# Altium footprint library Orion-Bridge.PcbLib: 21 footprints (part 2 of 2)
Each footprint in its own frame and in the unit in brackets; x right, y up, seen from the top. Pads: shape width x height; smd on the part's side, far side on the other; paste and mask are expansions set on the pad; w line width, h text height; cw(c..) or ccw(c..) is an arc to the next point about the centre after c.
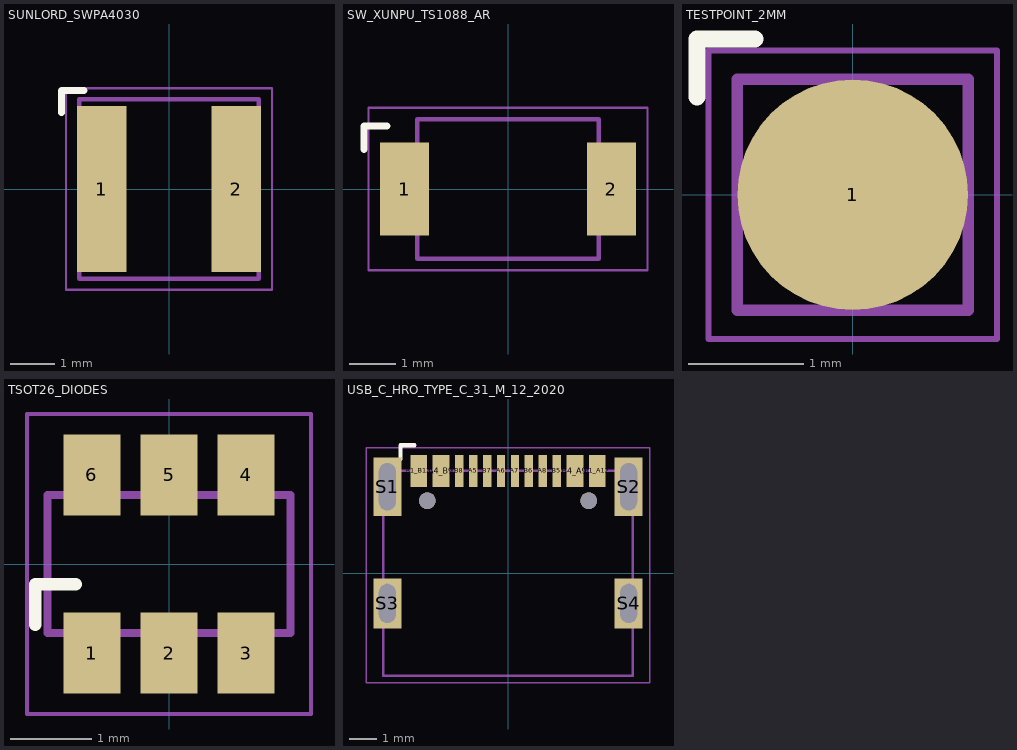
[diagram p1: the footprints below, top view; thin cyan lines are the x and y axes]

## SUNLORD_SWPA4030 [mm] "Sunlord SWPA datasheet2025-05-08 p2 recommended SWPA4030S pattern: gap1.9, padwidth1.1, padheight3.7."
height 3
pads (2):
  rect 1.1x3.7 smd: 1(-1.5,0) 2(1.5,0)
Top Overlay:
  lines w0.15: -2.4,1.7 -2.4,2.2 -1.9,2.2
Component bodies:
  lines w0.1: -2,-2 2,-2 2,2 -2,2 -2,-2
Courtyards:
  lines w0.05: -2.3,-2.25 2.3,-2.25 2.3,2.25 -2.3,2.25 -2.3,-2.25
3D body: height 3, standoff 0.1, extent -2,-2 2,2
3D body: height 3.02, standoff 3, extent -1.6,-1.6 1.6,1.6
3D body: height 0.18, standoff 0.03, extent -1.94,-1.48 -1.06,1.48
3D body: height 0.18, standoff 0.03, extent 1.06,-1.48 1.94,1.48

## SW_XUNPU_TS1088_AR [mm] "XUNPU TS-1088-ARXXXXXX manufacturer drawing: outer width5.50, inner gap3.40, padheight2.00; two terminals, no locating posts."
height 2
pads (2):
  rect 1.05x2 smd: 1(-2.225,0) 2(2.225,0)
Top Overlay:
  lines w0.15: -3.1,0.85 -3.1,1.35 -2.6,1.35
Component bodies:
  lines w0.1: -1.95,-1.5 1.95,-1.5 1.95,1.5 -1.95,1.5 -1.95,-1.5
Courtyards:
  lines w0.05: -3,-1.75 3,-1.75 3,1.75 -3,1.75 -3,-1.75
3D body: height 1.2, standoff 0.12, extent -1.95,-1.5 1.95,1.5
3D body: height 1.5, standoff 1.2, extent -1.9,-1.45 1.9,1.45
3D body: height 2, standoff 1.5, extent -0.9,-0.9 0.9,0.9
3D body: height 0.2, standoff 0.03, extent -2.675,-0.65 -1.775,0.65
3D body: height 0.2, standoff 0.03, extent 1.775,-0.65 2.675,0.65

## TESTPOINT_2MM [mm] "2 mm exposed top-copper test pad; no paste"
pads (1):
  round 2 smd: 1(0,0)
Top Overlay:
  lines w0.15: -1.35,0.85 -1.35,1.35 -0.85,1.35
Component bodies:
  lines w0.1: -1,-1 1,-1 1,1 -1,1 -1,-1
Courtyards:
  lines w0.05: -1.25,-1.25 1.25,-1.25 1.25,1.25 -1.25,1.25 -1.25,-1.25
3D body: height 0.06, standoff 0.03, extent -1,-1 1,1

## TSOT26_DIODES [mm] "Diodes DS41326 Rev3-2 p17 suggested TSOT26 copper: X=.70,Y=1.00,Y1=3.20 total span,C=.95. Top view: pin1 lower-left; pin4 upper-right."
height 1
pads (6):
  rect 0.7x1 smd: 1(-0.95,-1.1) 2(0,-1.1) 3(0.95,-1.1) 4(0.95,1.1) 5(0,1.1) 6(-0.95,1.1)
Top Overlay:
  lines w0.15: -1.65,-0.75 -1.65,-0.25 -1.15,-0.25
Component bodies:
  lines w0.1: -1.5,-0.85 1.5,-0.85 1.5,0.85 -1.5,0.85 -1.5,-0.85
Courtyards:
  lines w0.05: -1.75,-1.85 1.75,-1.85 1.75,1.85 -1.75,1.85 -1.75,-1.85
3D body: height 1, standoff 0.08, extent -1.5,-0.85 1.5,0.85
3D body: height 0.22, standoff 0.03, extent -1.175,-1.35 -0.725,-0.55
3D body: height 0.22, standoff 0.03, extent -0.225,-1.35 0.225,-0.55
3D body: height 0.22, standoff 0.03, extent 0.725,-1.35 1.175,-0.55
3D body: height 0.22, standoff 0.03, extent 0.725,0.55 1.175,1.35
3D body: height 0.22, standoff 0.03, extent -0.225,0.55 0.225,1.35
3D body: height 0.22, standoff 0.03, extent -1.175,0.55 -0.725,1.35
3D body: height 1.01, standoff 1, extent -1.03,-0.64 -0.77,-0.38

## USB_C_HRO_TYPE_C_31_M_12_2020 [mm] "HRO drawing dated2020-12-08 downloaded via JLC C165948. NOT older2018 KiCad footprint: updated front slots1.4, padwidth centres3.20/2.40 and padheight1.14. Body envelope3D is nominal. Shield copper enlarged by0.05mm peredge from manufacturer recommendation to provide0.20mm annular ring; drills unchanged."
height 3.26
pads (18):
  rect 0.6x1.14 smd: A1_B12(-3.2,3.67) A4_B9(-2.4,3.67) B1_A12(3.2,3.67) B4_A9(2.4,3.67)
  rect 0.3x1.14 smd: A5(-1.25,3.67) A6(-0.25,3.67) A7(0.25,3.67) A8(1.25,3.67) B5(1.75,3.67) B6(0.75,3.67) B7(-0.75,3.67) B8(-1.75,3.67)
  rect 1x2.1 hole 0.6 slot 1.7 at 90 deg paste-10: S1(-4.325,3.1) S2(4.325,3.1)
  rect 1x1.8 hole 0.6 slot 1.4 at 90 deg paste-10: S3(-4.325,-1.08) S4(4.325,-1.08)
  round 0.6 hole 0.6 unplated paste-10: ""(-2.89,2.6) ""(2.89,2.6)
Top Overlay:
  lines w0.15: -3.85,4.09 -3.85,4.59 -3.35,4.59
Component bodies:
  lines w0.1: -4.47,-3.675 4.47,-3.675 4.47,3.675 -4.47,3.675 -4.47,-3.675
Courtyards:
  lines w0.05: -5.075,-3.925 5.075,-3.925 5.075,4.49 -5.075,4.49 -5.075,-3.925
3D body: height 0.27, standoff 0.08, extent -4.47,-3.675 4.47,3.675
3D body: height 3.26, standoff 3.05, extent -4.47,-3.675 4.47,3.675
3D body: height 3.05, standoff 0.27, extent -4.47,-3.675 -4.27,3.675
3D body: height 3.05, standoff 0.27, extent 4.27,-3.675 4.47,3.675
3D body: height 3.03, standoff 0.28, extent -4.27,2.875 4.27,3.675
3D body: height 1.76, standoff 1.4, extent -3.345,-3.1 3.345,1.6
3D body: height 1.78, standoff 1.76, extent -2.86,-2.55 -2.64,0.25
3D body: height 1.78, standoff 1.76, extent -2.36,-2.55 -2.14,0.25
3D body: height 1.78, standoff 1.76, extent -1.86,-2.55 -1.64,0.25
3D body: height 1.78, standoff 1.76, extent -1.36,-2.55 -1.14,0.25
3D body: height 1.78, standoff 1.76, extent -0.86,-2.55 -0.64,0.25
3D body: height 1.78, standoff 1.76, extent -0.36,-2.55 -0.14,0.25
3D body: height 1.78, standoff 1.76, extent 0.14,-2.55 0.36,0.25
3D body: height 1.78, standoff 1.76, extent 0.64,-2.55 0.86,0.25
3D body: height 1.78, standoff 1.76, extent 1.14,-2.55 1.36,0.25
3D body: height 1.78, standoff 1.76, extent 1.64,-2.55 1.86,0.25
3D body: height 1.78, standoff 1.76, extent 2.14,-2.55 2.36,0.25
3D body: height 1.78, standoff 1.76, extent 2.64,-2.55 2.86,0.25
3D body: height 0.22, standoff 0.03, extent -3.375,3.195 -3.025,4.145
3D body: height 0.22, standoff 0.03, extent -2.575,3.195 -2.225,4.145
3D body: height 0.22, standoff 0.03, extent -1.855,3.195 -1.645,4.145
3D body: height 0.22, standoff 0.03, extent -1.355,3.195 -1.145,4.145
3D body: height 0.22, standoff 0.03, extent -0.855,3.195 -0.645,4.145
3D body: height 0.22, standoff 0.03, extent -0.355,3.195 -0.145,4.145
3D body: height 0.22, standoff 0.03, extent 0.145,3.195 0.355,4.145
3D body: height 0.22, standoff 0.03, extent 0.645,3.195 0.855,4.145
3D body: height 0.22, standoff 0.03, extent 1.145,3.195 1.355,4.145
3D body: height 0.22, standoff 0.03, extent 1.645,3.195 1.855,4.145
3D body: height 0.22, standoff 0.03, extent 2.225,3.195 2.575,4.145
3D body: height 0.22, standoff 0.03, extent 3.025,3.195 3.375,4.145
3D body: height 0.5, standoff -1.3, extent -4.45,2.6 -4.2,3.6
3D body: height 0.5, standoff -1.3, extent 4.2,2.6 4.45,3.6
3D body: height 0.5, standoff -1.3, extent -4.45,-1.58 -4.2,-0.58
3D body: height 0.5, standoff -1.3, extent 4.2,-1.58 4.45,-0.58